# Altium integrated library RC0805FR-0710RL.IntLib: 1 symbol
Pins are listed as number, name and electrical type; pins without a type are passive.

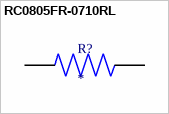
[diagram p0: symbol RC0805FR-0710RL]

## RC0805FR-0710RL
designator R?
Res Thick Film 0805 10 Ohm 1% 1/8W ï¿½200ppm/ï¿½C Molded SMD Paper T/R; MF: {'manufacturer': u'YAGEO'}; MP: RC0805FR-0710RL; Package: None; Price: None; Value: *; Availability: Unavailable
footprint RESC2012X60N
pins: 1, 2